# Altium footprint library Footprint-Lib-PhilsLab.PcbLib: 544 footprints (part 34 of 34)
Each footprint in its own frame and in the unit in brackets; x right, y up, seen from the top. Pads: shape width x height; smd on the part's side, far side on the other; paste and mask are expansions set on the pad; w line width, h text height; cw(c..) or ccw(c..) is an arc to the next point about the centre after c.
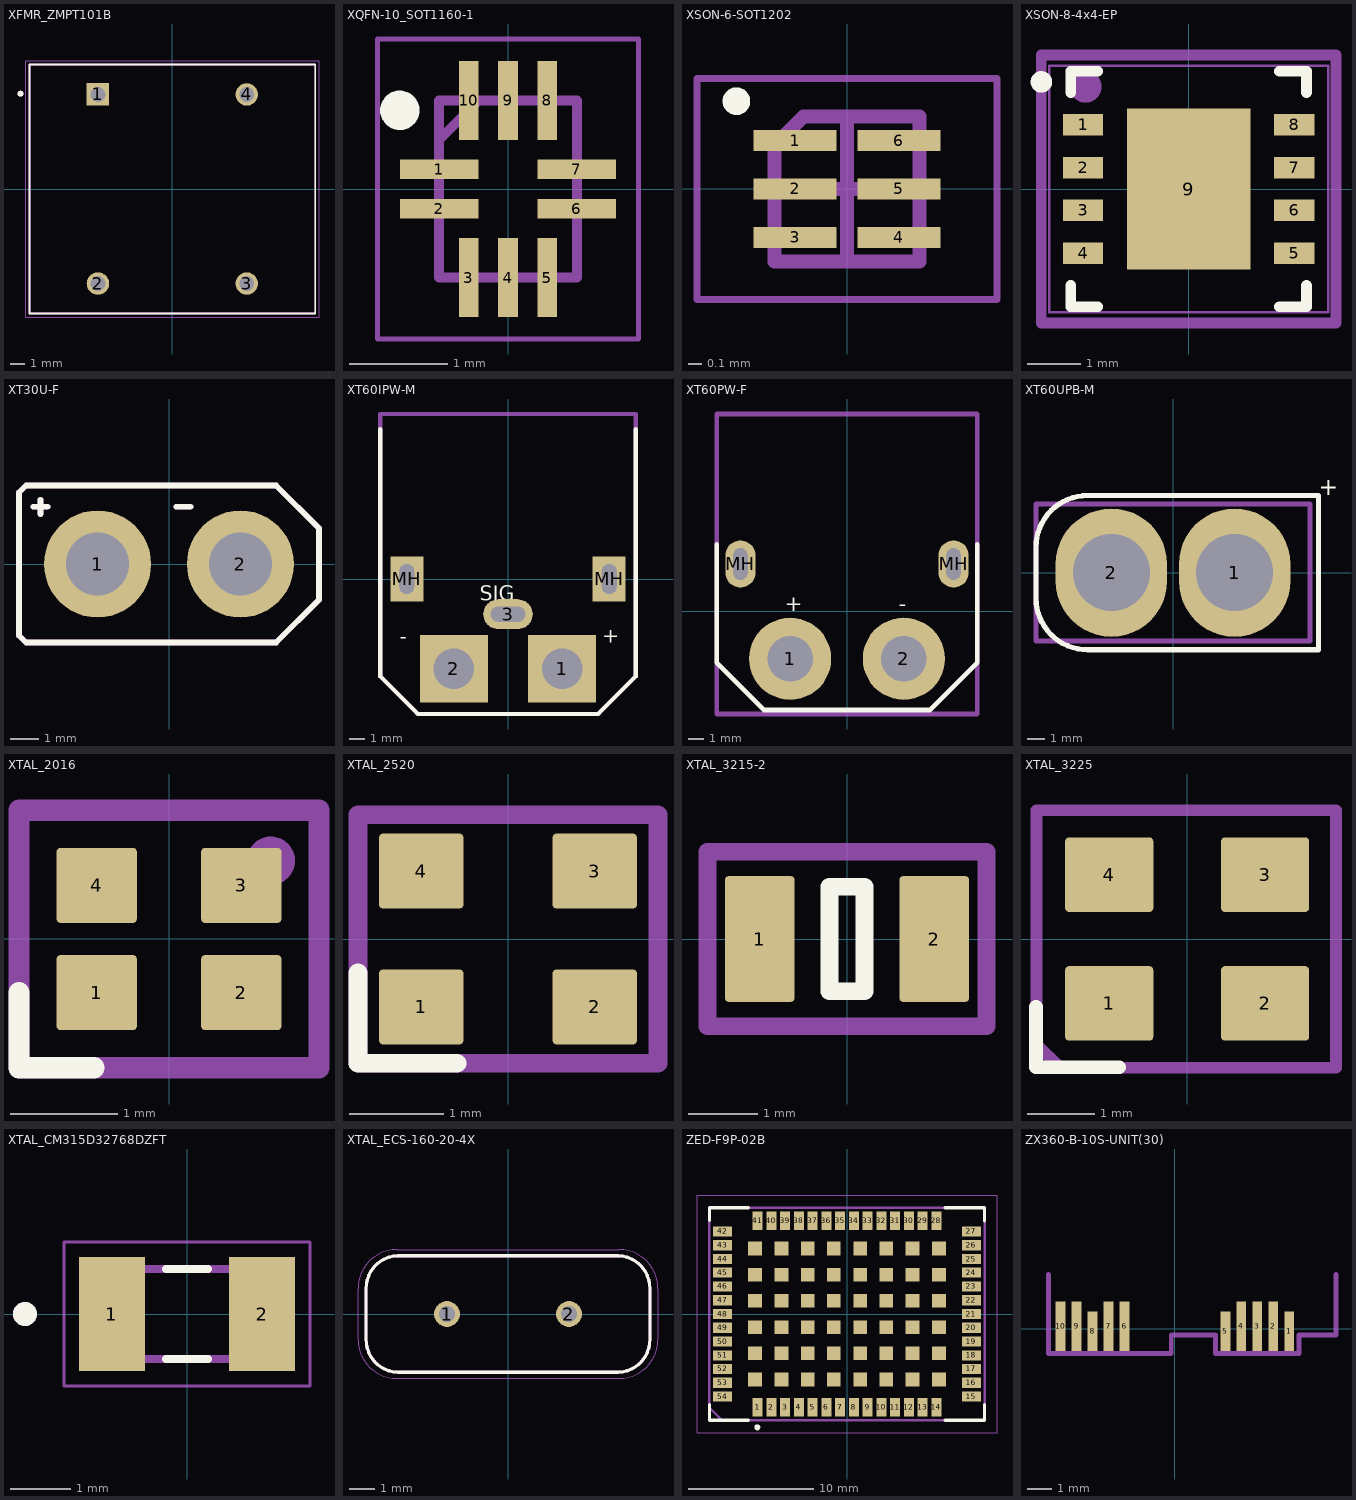
[diagram p33: the footprints below, top view; thin cyan lines are the x and y axes]

## XFMR_ZMPT101B [mm]
height 18.8
pads (4):
  rect 1.508x1.508 / inner round 1.508 / far side rect 1.508x1.508 hole 1: 1(-5,6.35)
  round 1.508 hole 1: 2(-5,-6.35) 3(5,-6.35) 4(5,6.35)
Top Overlay:
  circle w0.2: c-10.2,6.4 r0.1
  lines w0.127: -9.6,-8.35 9.6,-8.35 9.6,8.35 -9.6,8.35 -9.6,-8.35
Mechanical 13:
  circle w0.2: c-10.2,6.4 r0.1
  lines w0.127: -9.6,-8.35 -9.6,8.35 9.6,8.35 9.6,-8.35 -9.6,-8.35
Mechanical 15:
  lines w0.05: -9.85,-8.6 -9.85,8.6 9.85,8.6 9.85,-8.6 -9.85,-8.6
3D body "step_temp.STEP": height 18.8, standoff -3.5, extent -9.6,-8.35 9.6,8.35

## XQFN-10_SOT1160-1 [mm]
pads (10):
  rect 0.8x0.2 smd mask+0.05: 1(-0.7,0.2) 2(-0.7,-0.2) 6(0.7,-0.2) 7(0.7,0.2)
  rect 0.2x0.8 smd mask+0.05: 3(-0.4,-0.9) 4(0,-0.9) 5(0.4,-0.9) 8(0.4,0.9) 9(0,0.9) 10(-0.4,0.9)
Top Overlay:
  circle w0.2: c-1.1,0.8 r0.1
Mechanical 13:
  lines w0.1: -0.7,0.5 -0.3,0.9 ; -0.7,-0.9 -0.7,0.9 0.7,0.9 0.7,-0.9 -0.7,-0.9
  text "'.Designator'" at -5.84,-0.925 h1
Mechanical 15:
  lines w0.05: -1.325,-1.525 -1.325,1.525 1.325,1.525 1.325,-1.525 -1.325,-1.525
3D body "NX3DV42GU,115.stp": height 0.5, standoff 0, extent -0.75,-0.95 0.75,0.95

## XSON-6-SOT1202 [mm] "SON, 6-Leads, Body 0.98x1.00mm, Pitch 0.35mm, IPC Medium Density"
height 0.35
pads (6):
  rect 0.6x0.15 smd mask+0.05: 1(-0.375,0.35) 2(-0.375,0) 3(-0.375,-0.35) 4(0.375,-0.35) 5(0.375,0) 6(0.375,0.35)
Top Overlay:
  circle w0.1: c-0.8,0.635 r0.05
Mechanical 13:
  lines w0.1: -0.525,-0.525 0.525,-0.525 0.525,0.525 -0.316,0.525 -0.525,0.316 -0.525,-0.525
  text "'.Designator'" at -5.84,-0.925 h1
Mechanical 15:
  lines w0.05: -1.085,-0.8 -1.085,0.8 1.085,0.8 1.085,-0.8 -1.085,-0.8
  lines w0.1: -0.5,0 0.5,0 ; 0,-0.5 0,0.5
3D body "XSON-6.step": height 0.39, standoff 0, extent -0.5,-0.5 0.5,0.5

## XSON-8-4x4-EP [mm]
height 0.5
pads (9):
  rect 0.75x0.4 smd: 1(-1.97,1.2) 2(-1.97,0.4) 3(-1.97,-0.4) 4(-1.97,-1.2) 5(1.97,-1.2) 6(1.97,-0.4) 7(1.97,0.4) 8(1.97,1.2)
  rect 2.3x3 smd paste-1.15: 9(0,0)
Top Overlay:
  circle w0.2: c-2.75,2 r0.1
  lines w0.2: -2.2,-1.8 -2.2,-2.2 -1.695,-2.2 ; -2.2,1.8 -2.2,2.2 -1.695,2.2 ; 1.695,-2.2 2.2,-2.2 2.2,-1.8 ; 1.695,2.2 2.2,2.2 2.2,1.8
Top Paste:
  rectangle: -1.05,0.1 -0.1,1.4
  rectangle: -1.05,-1.4 -0.1,-0.1
  rectangle: 0.1,0.1 1.05,1.4
  rectangle: 0.1,-1.4 1.05,-0.1
Mechanical 13:
  circle w0.4: c-1.928,1.91 r0.1
  lines w0.2: -2.75,-2.5 -2.75,2.5 2.75,2.5 2.75,-2.5 -2.75,-2.5
  text "'.Designator'" at -5.815,-0.9 h1
Mechanical 15:
  lines w0.05: -2.605,-2.3 -2.605,2.3 2.605,2.3 2.605,-2.3 -2.605,-2.3
  lines w0.1: -0.5,0 0.5,0 ; 0,-0.5 0,0.5
3D body "XSON-8-EP(4x4).stp": height 0.5, standoff 0, extent -2.05,-2 2.05,2

## XT30U-F [mm]
pads (2):
  round 3.75 hole 2.2: 1(-2.5,0) 2(2.5,0)
Top Overlay:
  lines w0.2: -4.75,2 -4.25,2 ; -4.5,1.75 -4.5,2.25 ; 0.25,2 0.75,2 ; -5.25,-2.5 -5.25,0.25 -5.25,2.5 -5,2.75 3.75,2.75 5.25,1.25 5.25,-1.25 3.75,-2.75 -5,-2.75 -5.25,-2.5
Mechanical 13:
  lines w0.2: -4.75,2 -4.25,2 ; -4.5,1.75 -4.5,2.25 ; 0.25,2 0.75,2 ; -5.25,-2.5 -5.25,0.25 -5.25,2.5 -5,2.75 3.75,2.75 5.25,1.25 5.25,-1.25 3.75,-2.75 -5,-2.75 -5.25,-2.5
  text "'.Designator'" at -6.315,-1.4 h1
3D body "XT30U-F.stp": height 0, standoff 0, extent 13.25,9.75 13.25,9.75
3D body "XT30U-F.step": height 12.61, standoff -2.99, extent -5.225,-2.625 5.225,2.625

## XT60IPW-M [mm]
pads (5):
  rect 4.5x4.5 hole 2.7: 1(3.6,-6) 2(-3.6,-6)
  rrect100% 3.3x2 hole 1 slot 2.3 at 0 deg: 3(0,-2.35)
  rect 2.2x3 hole 1 slot 2 at 90 deg: MH(-6.75,0) MH(6.75,0)
Top Overlay:
  lines w0.3: -8.5,10 -8.5,-6.5 -6,-9 6,-9 8.5,-6.5 8.5,10
  text "SIG" at -1.9,-1.45 h1
  text "-" at -7.233,-4.325 h1
  text "+" at 6.267,-4.242 h1
Mechanical 13:
  lines w0.3: -8.5,-6.5 -8.5,11 8.5,11 8.5,-6.5 6,-9 -6,-9 -8.5,-6.5
  text "-" at -4.816,-7.575 h2
  text "+" at 2.184,-7.408 h2
  text "'.Designator'" at -6.315,-1.4 h1
3D body "XT60IPW-M.STEP": height 8.41, standoff -2.54, extent -7.75,-7.25 7.75,10.35

## XT60PW-F [mm]
pads (4):
  round 5.2 hole 2.9: 1(-3.6,-3) 2(3.6,-3)
  oval 1.9x3 hole 0.9 slot 2 at 90 deg: MH(-6.75,3) MH(6.75,3)
Top Overlay:
  lines w0.3: -8.25,4.25 -8.25,-1.879 -8.25,-3.25 -5.25,-6.25 5.25,-6.25 8.25,-3.25 8.25,4.25
  text "-" at 3.267,0 h1
  text "+" at -3.933,0 h1
Mechanical 13:
  lines w0.3: -8.25,-6.5 -8.25,12.5 8.25,12.5 8.25,-6.5 -8.25,-6.5
  text "'.Designator'" at -5.665,2.583 h1
  text "+" at -3.933,0 h1
  text "-" at 3.267,0 h1
3D body "XT60PW-F.STEP": height 8.41, standoff -2.54, extent -7.75,-4.85 7.75,12.35

## XT60UPB-M [mm]
pads (2):
  oval 6.5x7.5 hole 4.5 paste-2539.97: 1(3.6,0) 2(-3.6,0)
Top Overlay:
  lines w0.3: -8,-1.5 ccw(c-5,-1.5) -5,-4.5 8.5,-4.5 8.5,4.5 -5,4.5 ccw(c-5,1.5) -8,1.5 -8,-1.5
  text "+" at 8.517,4.508 h1
Mechanical 13:
  lines w0.3: -8,-4 -8,4 8,4 8,-4 -8,-4
  text "+" at 1.185,2.1 h1
  text "'.Designator'" at -5.815,-0.9 h1
3D body "XT60UPB-M.step": height 13.51, standoff -2.09, extent -7.692,-3.95 7.65,3.95

## XTAL_2016 [mm]
pads (4):
  rrect10% 0.75x0.7 smd: 1(-0.675,-0.5) 2(0.675,-0.5) 3(0.675,0.5) 4(-0.675,0.5)
Top Overlay:
  lines w0.2: -1.4,-0.5 -1.4,-1.2 -0.7,-1.2
Mechanical 13:
  circle w0.25: c0.951,0.73 r0.1
  lines w0.2: -1.4,-1.2 1.4,-1.2 1.4,1.2 -1.4,1.2 -1.4,-1.2
  text "'.Designator'" at -5.84,-0.925 h1
3D body "XTAL_2016.step": height 0.7, standoff 0, extent -1,-0.8 1,0.8

## XTAL_2520 [mm]
pads (4):
  rrect10% 0.9x0.8 smd mask+0: 1(-0.925,-0.725) 2(0.925,-0.725) 3(0.925,0.725) 4(-0.925,0.725)
Top Overlay:
  lines w0.2: -1.6,-0.363 -1.6,-1.325 -0.544,-1.325
Mechanical 13:
  circle w0.25: c0.951,0.73 r0.1
  lines w0.2: -1.6,-1.325 -1.6,1.325 1.6,1.325 1.6,-1.325 -1.6,-1.325
  text "'.Designator'" at -5.84,-0.925 h1
3D body "XTAL-2520.step": height 0.8, standoff -0.03, extent -1.25,-1 1.25,1

## XTAL_3215-2 [mm]
pads (2):
  rrect10% 1x1.8 smd: 1(-1.25,0) 2(1.25,0)
Top Overlay:
  lines w0.254: -0.25,-0.75 -0.25,0.75 0.25,0.75 0.25,-0.75 -0.25,-0.75
Mechanical 13:
  lines w0.254: -2,-1.25 2,-1.25 2,1.25 -2,1.25 -2,-1.25
  text ".Designator" at -4.998,-0.333 h1
3D body "XTAL_3215-2.STEP": height 0.91, standoff 0.01, extent -1.6,-0.75 1.6,0.75

## XTAL_3225 [mm]
pads (4):
  rrect10% 1.3x1.1 smd: 1(-1.15,-0.95) 2(1.15,-0.95) 3(1.15,0.95) 4(-1.15,0.95)
Top Overlay:
  lines w0.2: -2.231,-1 -2.231,-1.893 -1,-1.893
Mechanical 13:
  circle w0.254: c-1.15,-0.95 r0.112
  lines w0.175: -0.478,1.903 2.197,1.903 2.197,-1.9 -1.875,-1.9 -2.225,-1.55 -2.225,1.903 0.472,1.903
  text "'.Designator'" at -5.665,-0.417 h1
3D body "Y3225.step": height 0.61, standoff 0, extent -1.6,-1.275 1.6,1.225

## XTAL_CM315D32768DZFT [mm]
pads (2):
  rect 1.1x1.9 smd: 1(-1.25,0) 2(1.25,0)
Top Overlay:
  circle w0.2: c-2.7,0 r0.1
  lines w0.127: -0.35,-0.75 0.35,-0.75 ; -0.35,0.75 0.35,0.75
Mechanical 13:
  circle w0.2: c-2.7,0 r0.1
  lines w0.127: -1.6,-0.75 -1.6,0.75 1.6,0.75 1.6,-0.75 -1.6,-0.75
Mechanical 15:
  lines w0.05: -2.05,-1.2 -2.05,1.2 2.05,1.2 2.05,-1.2 -2.05,-1.2

## XTAL_ECS-160-20-4X [mm]
pads (2):
  round 1.03 hole 0.63: 1(-2.44,0) 2(2.44,0)
Top Overlay:
  lines w0.127: -5.675,-1.012 ccw(c-4.38,-1.035) -4.403,-2.33 ; -5.675,-1.01 -5.675,1.01 ; -5.675,1.012 cw(c-4.38,1.035) -4.403,2.33 ; -4.405,-2.33 4.405,-2.33 ; -4.405,2.33 4.405,2.33 ; 4.403,-2.33 ccw(c4.38,-1.035) 5.675,-1.012 ; 4.403,2.33 cw(c4.38,1.035) 5.675,1.012 ; 5.675,-1.01 5.675,1.01
Mechanical 13:
  lines w0.127: -5.675,-1.012 ccw(c-4.38,-1.035) -4.403,-2.33 ; -5.675,-1.01 -5.675,1.01 ; -5.675,1.012 cw(c-4.38,1.035) -4.403,2.33 ; -4.405,-2.33 4.405,-2.33 ; -4.405,2.33 4.405,2.33 ; 4.403,-2.33 ccw(c4.38,-1.035) 5.675,-1.012 ; 4.403,2.33 cw(c4.38,1.035) 5.675,1.012 ; 5.675,-1.01 5.675,1.01
Mechanical 15:
  lines w0.05: -6,-1.01 ccw(c-4.43,-1.01) -4.43,-2.58 4.43,-2.58 ccw(c4.43,-1.01) 6,-1.01 6,1.01 ccw(c4.43,1.01) 4.43,2.58 -4.43,2.58 ccw(c-4.43,1.01) -6,1.01 -6,-1.01

## ZED-F9P-02B [mm]
pads (102):
  rect 0.8x1.5 smd mask+0.07: 1(-7.15,-7.45) 2(-6.05,-7.45) 3(-4.95,-7.45) 4(-3.85,-7.45) 5(-2.75,-7.45) 6(-1.65,-7.45) 7(-0.55,-7.45) 8(0.55,-7.45) 9(1.65,-7.45) 10(2.75,-7.45) 11(3.85,-7.45) 12(4.95,-7.45) 13(6.05,-7.45) 14(7.15,-7.45) 28(7.15,7.45) 29(6.05,7.45) 30(4.95,7.45) 31(3.85,7.45) 32(2.75,7.45) 33(1.65,7.45) 34(0.55,7.45) 35(-0.55,7.45) 36(-1.65,7.45) 37(-2.75,7.45) 38(-3.85,7.45) 39(-4.95,7.45) 40(-6.05,7.45) 41(-7.15,7.45)
  rect 1.5x0.8 smd mask+0.07: 15(9.95,-6.6) 16(9.95,-5.5) 17(9.95,-4.4) 18(9.95,-3.3) 19(9.95,-2.2) 20(9.95,-1.1) 21(9.95,0) 22(9.95,1.1) 23(9.95,2.2) 24(9.95,3.3) 25(9.95,4.4) 26(9.95,5.5) 27(9.95,6.6) 42(-9.95,6.6) 43(-9.95,5.5) 44(-9.95,4.4) 45(-9.95,3.3) 46(-9.95,2.2) 47(-9.95,1.1) 48(-9.95,0) 49(-9.95,-1.1) 50(-9.95,-2.2) 51(-9.95,-3.3) 52(-9.95,-4.4) 53(-9.95,-5.5) 54(-9.95,-6.6)
  rect 1.1x1.1 smd mask+0.07: EPAD(-7.35,-5.25) EPAD(-7.35,-3.15) EPAD(-7.35,-1.05) EPAD(-7.35,1.05) EPAD(-7.35,3.15) EPAD(-7.35,5.25) EPAD(-5.25,-5.25) EPAD(-5.25,-3.15) EPAD(-5.25,-1.05) EPAD(-5.25,1.05) EPAD(-5.25,3.15) EPAD(-5.25,5.25) EPAD(-3.15,-5.25) EPAD(-3.15,-3.15) EPAD(-3.15,-1.05) EPAD(-3.15,1.05) EPAD(-3.15,3.15) EPAD(-3.15,5.25) EPAD(-1.05,-5.25) EPAD(-1.05,-3.15) EPAD(-1.05,-1.05) EPAD(-1.05,1.05) EPAD(-1.05,3.15) EPAD(-1.05,5.25) EPAD(1.05,-5.25) EPAD(1.05,-3.15) EPAD(1.05,-1.05) EPAD(1.05,1.05) EPAD(1.05,3.15) EPAD(1.05,5.25) EPAD(3.15,-5.25) EPAD(3.15,-3.15) EPAD(3.15,-1.05) EPAD(3.15,1.05) EPAD(3.15,3.15) EPAD(3.15,5.25) EPAD(5.25,-5.25) EPAD(5.25,-3.15) EPAD(5.25,-1.05) EPAD(5.25,1.05) EPAD(5.25,3.15) EPAD(5.25,5.25) EPAD(7.35,-5.25) EPAD(7.35,-3.15) EPAD(7.35,-1.05) EPAD(7.35,1.05) EPAD(7.35,3.15) EPAD(7.35,5.25)
Top Overlay:
  circle w0.254: c-7.175,-9.068 r0.112
  lines w0.25: -11,-8.5 -7.9,-8.5 -11,-8.5 ; -11,-8.5 -11,-7.25 -11,-8.5 ; -11,8.5 -7.9,8.5 -11,8.5 ; -11,8.5 -11,7.5 -11,8.5 ; 11,-8.5 11,-7.25 11,-8.5 ; 11,-8.5 7.85,-8.5 11,-8.5 ; 11,8.5 11,7.45 11,8.5 ; 11,8.5 7.85,8.5 11,8.5
Mechanical 13:
  lines w0.2: -11,-7.5 -11,8.5 11,8.5 11,-8.5 -10,-8.5 -11,-7.5
  text "'.Designator'" at -7.231,-1.087 h1.25
Mechanical 15:
  lines w0.1: -12,-9.5 -12,9.5 12,9.5 12,-9.5 -12,-9.5
3D body "ZED-F9P.STEP": height 2.49, standoff 0, extent -11,-8.5 11,8.5

## ZX360-B-10S-UNIT(30) [mm]
pads (10):
  rect 0.4x1.6 smd mask+0.07: 1(4.65,-0.1) 5(2.05,-0.1) 8(-3.35,-0.1)
  rect 0.4x2 smd mask+0.07: 2(4,0.1) 3(3.35,0.1) 4(2.7,0.1) 6(-2.05,0.1) 7(-2.7,0.1) 9(-4,0.1) 10(-4.65,0.1)
Mechanical 13:
  lines w0.2: -5.15,2.2 -5.15,-1 -0.15,-1 -0.15,-0.25 1.65,-0.25 1.65,-1 5.05,-1 5.05,-0.25 6.55,-0.25 6.55,2.2
  text "PCB OUTLINE" at -2.436,-1.85 h0.5
  text "'.Designator'" at -9.859,-6.687 h1.25
3D body "ZX360-B-10S-UNIT.stp": height 2.86, standoff -1.34, extent -6.051,-12.6 7.399,2.25